# Altium footprint library LED.PcbLib: 56 footprints (part 1 of 4)
Each footprint in its own frame and in the unit in brackets; x right, y up, seen from the top. Pads: shape width x height; smd on the part's side, far side on the other; paste and mask are expansions set on the pad; w line width, h text height; cw(c..) or ccw(c..) is an arc to the next point about the centre after c.
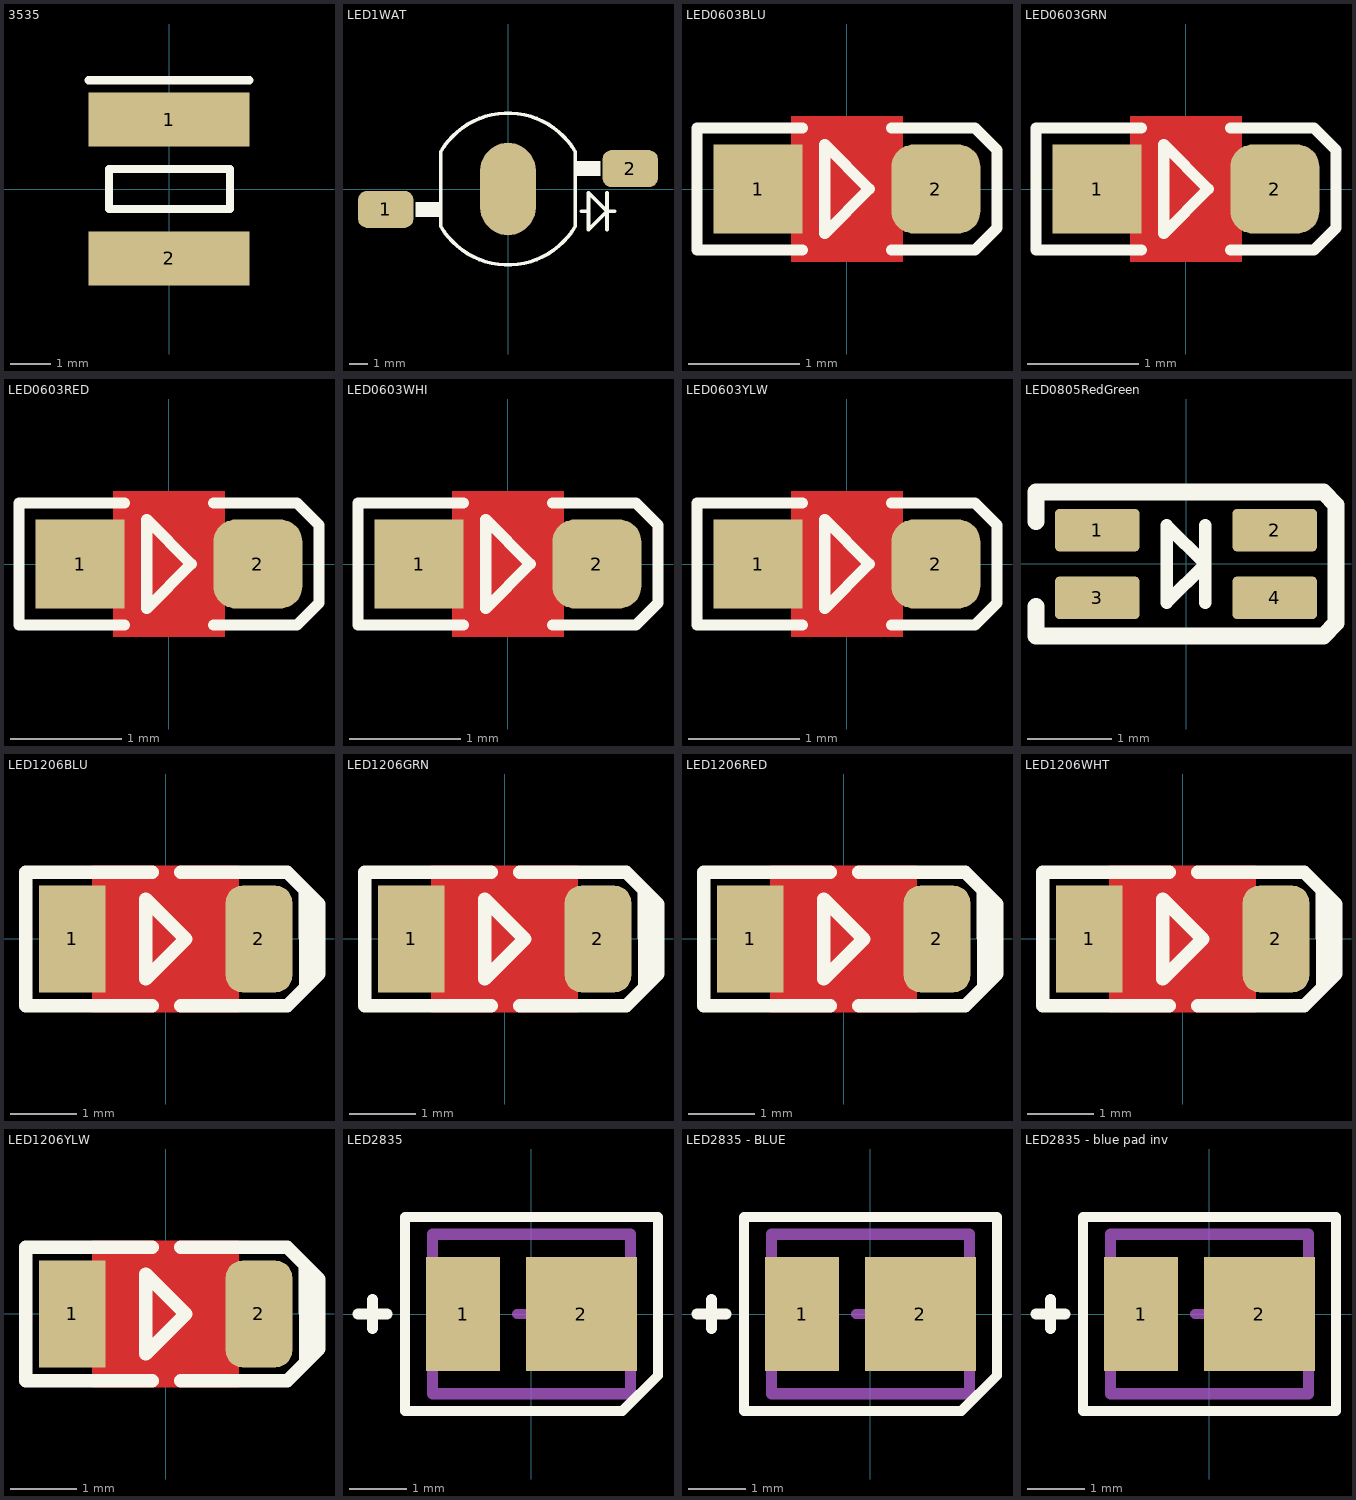
[diagram p0: the footprints below, top view; thin cyan lines are the x and y axes]

## 3535 [mm]
pads (2):
  rect 4x1.35 smd: 1(0,1.725) 2(0,-1.725)
Top Overlay:
  lines w0.2: -2,2.7 2,2.7 ; -1.489,-0.5 1.511,-0.5 1.511,0.5 -1.489,0.5 -1.489,-0.5
3D body "3535.STEP": height 1.98, standoff 0, extent -1.725,-1.725 1.725,1.725

## LED1WAT [mm] "LED, 1WATT"
pads (3):
  rrect50% 3x2 smd: 1(-6.6,-1.1) 2(6.6,1.1)
  oval 3x5 smd: ""(0,0)
Top Overlay:
  region: -3.637,-0.7 -5,-0.7 -5,-1.5 -3.637,-1.5
  rectangle: 3.637,0.7 5,1.5
  lines w0.2: 3.95,-1.2 4.35,-1.2 ; 5.35,-2.2 5.35,-0.2 ; 5.75,-1.2 5.35,-1.2 ; 5.35,-1.2 4.35,-2.2 4.35,-0.2 5.35,-1.2 ; -3.637,-2 ccw(c0,0.1) 3.637,-2 3.637,2 ccw(c0,-0.1) -3.637,2 -3.637,-2
Top Designator:
  text ".Designator" at -3.71,-0.344 h1.52
3D body "SW3dPS-Power LED2.STEP": height 5.55, standoff 0, extent -7.25,-4 7.25,4

## LED0603BLU [mm] "LED SMD 0603, BLUE"
pads (2):
  rect 0.8x0.8 smd mask+0.075: 1(-0.8,0)
  rrect50% 0.8x0.8 smd mask+0.075: 2(0.8,0)
Top Layer:
  pour cut-out: -0.5,0.654 0.5,0.654 0.5,-0.654 -0.5,-0.654
Top Overlay:
  lines w0.1: -0.4,-0.55 -1.35,-0.55 -1.35,0.55 -0.4,0.55 ; 0.4,-0.55 1.15,-0.55 1.35,-0.35 1.35,0.35 1.15,0.55 0.4,0.55 ; -0.2,-0.4 -0.2,0.4 0.2,0 -0.2,-0.4
Top Designator:
  text ".Designator" at -3.71,-0.344 h1.52
3D body: height 0.5, standoff 0, extent -0.4,-0.3 0.4,0.3
3D body: height 0.4, standoff 0, extent -0.6,-0.4 0.6,0.4
3D body: height 0.4, standoff 0, extent -0.8,-0.4 -0.6,0.4
3D body: height 0.4, standoff 0, extent 0.6,-0.4 0.8,0.4

## LED0603GRN [mm] "LED SMD 0603, GREEN"
pads (2):
  rect 0.8x0.8 smd mask+0.075: 1(-0.8,0)
  rrect50% 0.8x0.8 smd mask+0.075: 2(0.8,0)
Top Layer:
  pour cut-out: -0.5,0.654 0.5,0.654 0.5,-0.654 -0.5,-0.654
Top Overlay:
  lines w0.1: -0.4,-0.55 -1.35,-0.55 -1.35,0.55 -0.4,0.55 ; 0.4,-0.55 1.15,-0.55 1.35,-0.35 1.35,0.35 1.15,0.55 0.4,0.55 ; -0.2,-0.4 0.2,0 -0.2,0.4 -0.2,-0.4
Top Designator:
  text ".Designator" at -3.71,-0.344 h1.52
3D body: height 0.5, standoff 0, extent -0.4,-0.3 0.4,0.3
3D body: height 0.4, standoff 0, extent -0.6,-0.4 0.6,0.4
3D body: height 0.4, standoff 0, extent -0.8,-0.4 -0.6,0.4
3D body: height 0.4, standoff 0, extent 0.6,-0.4 0.8,0.4

## LED0603RED [mm] "LED SMD 0603, RED"
pads (2):
  rect 0.8x0.8 smd mask+0.075: 1(-0.8,0)
  rrect50% 0.8x0.8 smd mask+0.075: 2(0.8,0)
Top Layer:
  pour cut-out: -0.5,0.654 0.5,0.654 0.5,-0.654 -0.5,-0.654
Top Overlay:
  lines w0.1: -0.4,-0.55 -1.35,-0.55 -1.35,0.55 -0.4,0.55 ; 0.4,-0.55 1.15,-0.55 1.35,-0.35 1.35,0.35 1.15,0.55 0.4,0.55 ; -0.2,-0.4 -0.2,0.4 0.2,0 -0.2,-0.4
Top Designator:
  text ".Designator" at -3.71,-0.344 h1.52
3D body: height 0.4, standoff 0, extent -0.6,-0.4 0.6,0.4
3D body: height 0.5, standoff 0, extent -0.4,-0.3 0.4,0.3
3D body: height 0.4, standoff 0, extent -0.8,-0.4 -0.6,0.4
3D body: height 0.4, standoff 0, extent 0.6,-0.4 0.8,0.4

## LED0603WHI [mm] "LED SMD 0603, RED"
pads (2):
  rect 0.8x0.8 smd mask+0.075: 1(-0.8,0)
  rrect50% 0.8x0.8 smd mask+0.075: 2(0.8,0)
Top Layer:
  pour cut-out: -0.5,0.654 0.5,0.654 0.5,-0.654 -0.5,-0.654
Top Overlay:
  lines w0.1: -0.4,-0.55 -1.35,-0.55 -1.35,0.55 -0.4,0.55 ; 0.4,-0.55 1.15,-0.55 1.35,-0.35 1.35,0.35 1.15,0.55 0.4,0.55 ; -0.2,-0.4 0.2,0 -0.2,0.4 -0.2,-0.4
Top Designator:
  text ".Designator" at -3.71,-0.344 h1.52
3D body: height 0.4, standoff 0, extent 0.6,-0.4 0.8,0.4
3D body: height 0.4, standoff 0, extent -0.8,-0.4 -0.6,0.4
3D body: height 0.5, standoff 0, extent -0.4,-0.3 0.4,0.3
3D body: height 0.4, standoff 0, extent -0.6,-0.4 0.6,0.4

## LED0603YLW [mm] "LED SMD 0603, YELLOW"
pads (2):
  rect 0.8x0.8 smd mask+0.075: 1(-0.8,0)
  rrect50% 0.8x0.8 smd mask+0.075: 2(0.8,0)
Top Layer:
  pour cut-out: -0.5,0.654 0.5,0.654 0.5,-0.654 -0.5,-0.654
Top Overlay:
  lines w0.1: -0.4,-0.55 -1.35,-0.55 -1.35,0.55 -0.4,0.55 ; 0.4,-0.55 1.15,-0.55 1.35,-0.35 1.35,0.35 1.15,0.55 0.4,0.55 ; -0.2,-0.4 -0.2,0.4 0.2,0 -0.2,-0.4
Top Designator:
  text ".Designator" at -3.71,-0.344 h1.52
3D body: height 0.4, standoff 0, extent 0.6,-0.4 0.8,0.4
3D body: height 0.4, standoff 0, extent -0.8,-0.4 -0.6,0.4
3D body: height 0.4, standoff 0, extent -0.6,-0.4 0.6,0.4
3D body: height 0.5, standoff 0, extent -0.4,-0.3 0.4,0.3

## LED0805RedGreen [mm]
height 1.1
pads (4):
  rrect20% 1x0.5 smd: 1(-1.05,0.4) 2(1.05,0.4) 3(-1.05,-0.4) 4(1.05,-0.4)
Top Overlay:
  lines w0.15: -0.229,-0.457 -0.229,0.457 ; -0.229,-0.457 0.229,0 ; -0.229,-0.457 -0.229,0.457 ; -0.229,-0.457 0.229,0 ; -0.229,0.457 0.229,0 ; -0.229,0.457 0.229,0 ; 0.229,-0.457 0.229,0.457 0.229,-0.457
  lines w0.2: -1.775,-0.5 -1.775,-0.85 1.625,-0.85 1.775,-0.7 1.775,0.7 1.625,0.85 -1.775,0.85 -1.775,0.5
Top Designator:
  text ".Designator" at -2.433,-0.226 h1

## LED1206BLU [mm] "LED, 1206, BLUE"
pads (2):
  rect 1x1.6 smd paste-0.2 mask+0.075: 1(-1.4,0)
  rrect50% 1x1.6 smd paste-0.2 mask+0.075: 2(1.4,0)
Top Layer:
  pour cut-out: -1.1,1.1 -1.1,-1.1 1.1,-1.1 1.1,1.1
Top Overlay:
  region: 2,0.7 2,-0.7 2.3,-0.4 2.3,0.4
  lines w0.2: -0.2,-1 -2.1,-1 -2.1,1 -0.2,1 ; 0.225,-1 1.825,-1 2.299,-0.526 ; 0.225,1 1.825,1 2.299,0.526 ; 2.3,-0.5 2.3,0.5 ; -0.3,-0.6 0.3,0 -0.3,0.6 -0.3,-0.6
Top Designator:
  text ".Designator" at -3.61,-0.344 h1.52
3D body "User Library-Wurth Elektronik WL-SMCW 1206 (3216) LED Lens (Separate Body).step": height 0.68, standoff 0.28, extent -1,-0.8 1,0.8
3D body "User Library-Wurth Elektronik WL-SMCW 1206 (3216) LED Base (Separate Lens).step": height 0.62, standoff 0, extent -1.6,-0.8 1.6,0.8

## LED1206GRN [mm] "LED, 1206, GREEN"
pads (2):
  rect 1x1.6 smd paste-0.2 mask+0.075: 1(-1.4,0)
  rrect50% 1x1.6 smd paste-0.2 mask+0.075: 2(1.4,0)
Top Layer:
  pour cut-out: -1.1,1.1 -1.1,-1.1 1.1,-1.1 1.1,1.1
Top Overlay:
  region: 2,0.7 2,-0.7 2.3,-0.4 2.3,0.4
  lines w0.2: -0.2,-1 -2.1,-1 -2.1,1 -0.2,1 ; 0.225,-1 1.825,-1 2.299,-0.526 ; 0.225,1 1.825,1 2.299,0.526 ; 2.3,-0.5 2.3,0.5 ; -0.3,-0.6 -0.3,0.6 0.3,0 -0.3,-0.6
Top Designator:
  text ".Designator" at -3.61,-0.344 h1.52
3D body "User Library-Wurth Elektronik WL-SMCW 1206 (3216) LED Lens (Separate Body).step": height 0.68, standoff 0.28, extent -1,-0.8 1,0.8
3D body "User Library-Wurth Elektronik WL-SMCW 1206 (3216) LED Base (Separate Lens).step": height 0.62, standoff 0, extent -1.6,-0.8 1.6,0.8

## LED1206RED [mm] "LED, 1206, RED"
pads (2):
  rect 1x1.6 smd paste-0.2 mask+0.075: 1(-1.4,0)
  rrect50% 1x1.6 smd paste-0.2 mask+0.075: 2(1.4,0)
Top Layer:
  pour cut-out: -1.1,1.1 -1.1,-1.1 1.1,-1.1 1.1,1.1
Top Overlay:
  region: 2,0.7 2,-0.7 2.3,-0.4 2.3,0.4
  lines w0.2: -0.2,-1 -2.1,-1 -2.1,1 -0.2,1 ; 0.225,-1 1.825,-1 2.299,-0.526 ; 0.225,1 1.825,1 2.299,0.526 ; 2.3,-0.5 2.3,0.5 ; -0.3,-0.6 -0.3,0.6 0.3,0 -0.3,-0.6
Top Designator:
  text ".Designator" at -3.61,-0.344 h1.52
3D body "User Library-Wurth Elektronik WL-SMCW 1206 (3216) LED Lens (Separate Body).step": height 0.68, standoff 0.28, extent -1,-0.8 1,0.8
3D body "User Library-Wurth Elektronik WL-SMCW 1206 (3216) LED Base (Separate Lens).step": height 0.62, standoff 0, extent -1.6,-0.8 1.6,0.8

## LED1206WHT [mm] "LED, 1206, WHITE"
pads (2):
  rect 1x1.6 smd paste-0.2 mask+0.075: 1(-1.4,0)
  rrect50% 1x1.6 smd paste-0.2 mask+0.075: 2(1.4,0)
Top Layer:
  pour cut-out: -1.1,1.1 -1.1,-1.1 1.1,-1.1 1.1,1.1
Top Overlay:
  region: 2,0.7 2,-0.7 2.3,-0.4 2.3,0.4
  lines w0.2: -0.2,-1 -2.1,-1 -2.1,1 -0.2,1 ; 0.225,-1 1.825,-1 2.299,-0.526 ; 0.225,1 1.825,1 2.299,0.526 ; 2.3,-0.5 2.3,0.5 ; -0.3,-0.6 0.3,0 -0.3,0.6 -0.3,-0.6
Top Designator:
  text ".Designator" at -3.61,-0.344 h1.52
3D body "User Library-Wurth Elektronik WL-SMCW 1206 (3216) LED Base (Separate Lens).step": height 0.62, standoff 0, extent -1.6,-0.8 1.6,0.8
3D body "User Library-Wurth Elektronik WL-SMCW 1206 (3216) LED Lens (Separate Body).step": height 0.68, standoff 0.28, extent -1,-0.8 1,0.8

## LED1206YLW [mm] "LED, 1206, YELLOW"
pads (2):
  rect 1x1.6 smd paste-0.2 mask+0.075: 1(-1.4,0)
  rrect50% 1x1.6 smd paste-0.2 mask+0.075: 2(1.4,0)
Top Layer:
  pour cut-out: -1.1,1.1 -1.1,-1.1 1.1,-1.1 1.1,1.1
Top Overlay:
  region: 2,0.7 2,-0.7 2.3,-0.4 2.3,0.4
  lines w0.2: -0.2,-1 -2.1,-1 -2.1,1 -0.2,1 ; 0.225,-1 1.825,-1 2.299,-0.526 ; 0.225,1 1.825,1 2.299,0.526 ; 2.3,-0.5 2.3,0.5 ; -0.3,-0.6 0.3,0 -0.3,0.6 -0.3,-0.6
Top Designator:
  text ".Designator" at -3.61,-0.344 h1.52
3D body "User Library-Wurth Elektronik WL-SMCW 1206 (3216) LED Lens (Separate Body).step": height 0.68, standoff 0.28, extent -1,-0.8 1,0.8
3D body "User Library-Wurth Elektronik WL-SMCW 1206 (3216) LED Base (Separate Lens).step": height 0.62, standoff 0, extent -1.6,-0.8 1.6,0.8

## LED2835 [mm] "LM281+ RA90 4000K"
pads (2):
  rect 1.3x2 smd: 1(-1.2,0)
  rect 1.95x2 smd: 2(0.875,0)
Top Overlay:
  lines w0.178: -2.224,1.705 2.223,1.705 2.223,-1.079 1.597,-1.705 -2.223,-1.705 ; -2.224,1.705 -2.223,-1.705
  lines w0.2: -3.048,0 -2.54,0 ; -2.794,-0.254 -2.794,0.254
Top Designator:
  text ".Designator" at -4.128,-0.344 h1.52
Bottom Designator:
  lines w0.2: -1.74,-1.4 1.74,-1.4 1.74,1.4 -1.74,1.4 -1.74,-1.4
Mechanical 15:
  lines w0.178: -0.254,0 0.254,0 ; 0,-0.254 0,0.254
3D body "LED_2835.STEP": height 0.7, standoff 0, extent -1.75,-1.4 1.75,1.4

## LED2835 - BLUE [mm]
pads (2):
  rect 1.3x2 smd: 1(-1.2,0)
  rect 1.95x2 smd: 2(0.875,0)
Top Overlay:
  lines w0.178: -2.224,1.705 2.223,1.705 2.223,-1.079 1.597,-1.705 -2.223,-1.705 ; -2.224,1.705 -2.223,-1.705
  lines w0.2: -3.048,0 -2.54,0 ; -2.794,-0.254 -2.794,0.254
Top Designator:
  text ".Designator" at -4.128,-0.344 h1.52
Bottom Designator:
  lines w0.2: -1.74,-1.4 1.74,-1.4 1.74,1.4 -1.74,1.4 -1.74,-1.4
Mechanical 15:
  lines w0.178: -0.254,0 0.254,0 ; 0,-0.254 0,0.254
3D body "LED_2835. blue.STEP": height 0.7, standoff 0, extent -1.75,-1.4 1.75,1.4

## LED2835 - blue pad inv [mm]
pads (2):
  rect 1.3x2 smd: 1(-1.2,0)
  rect 1.95x2 smd: 2(0.875,0)
Top Overlay:
  lines w0.178: -2.224,1.705 2.223,1.705 2.223,-1.705 -2.223,-1.705 ; -2.224,1.705 -2.223,-1.705
  lines w0.2: -3.048,0 -2.54,0 ; -2.794,-0.254 -2.794,0.254
Top Designator:
  text ".Designator" at -4.128,-0.344 h1.52
Bottom Designator:
  lines w0.2: -1.74,-1.4 1.74,-1.4 1.74,1.4 -1.74,1.4 -1.74,-1.4
Mechanical 15:
  lines w0.178: -0.254,0 0.254,0 ; 0,-0.254 0,0.254
3D body "LED_2835. blue.STEP": height 0.7, standoff 0, extent -1.75,-1.4 1.75,1.4